# Altium footprint library Conectores.PcbLib: 55 footprints (part 3 of 4)
Each footprint in its own frame and in the unit in brackets; x right, y up, seen from the top. Pads: shape width x height; smd on the part's side, far side on the other; paste and mask are expansions set on the pad; w line width, h text height; cw(c..) or ccw(c..) is an arc to the next point about the centre after c.
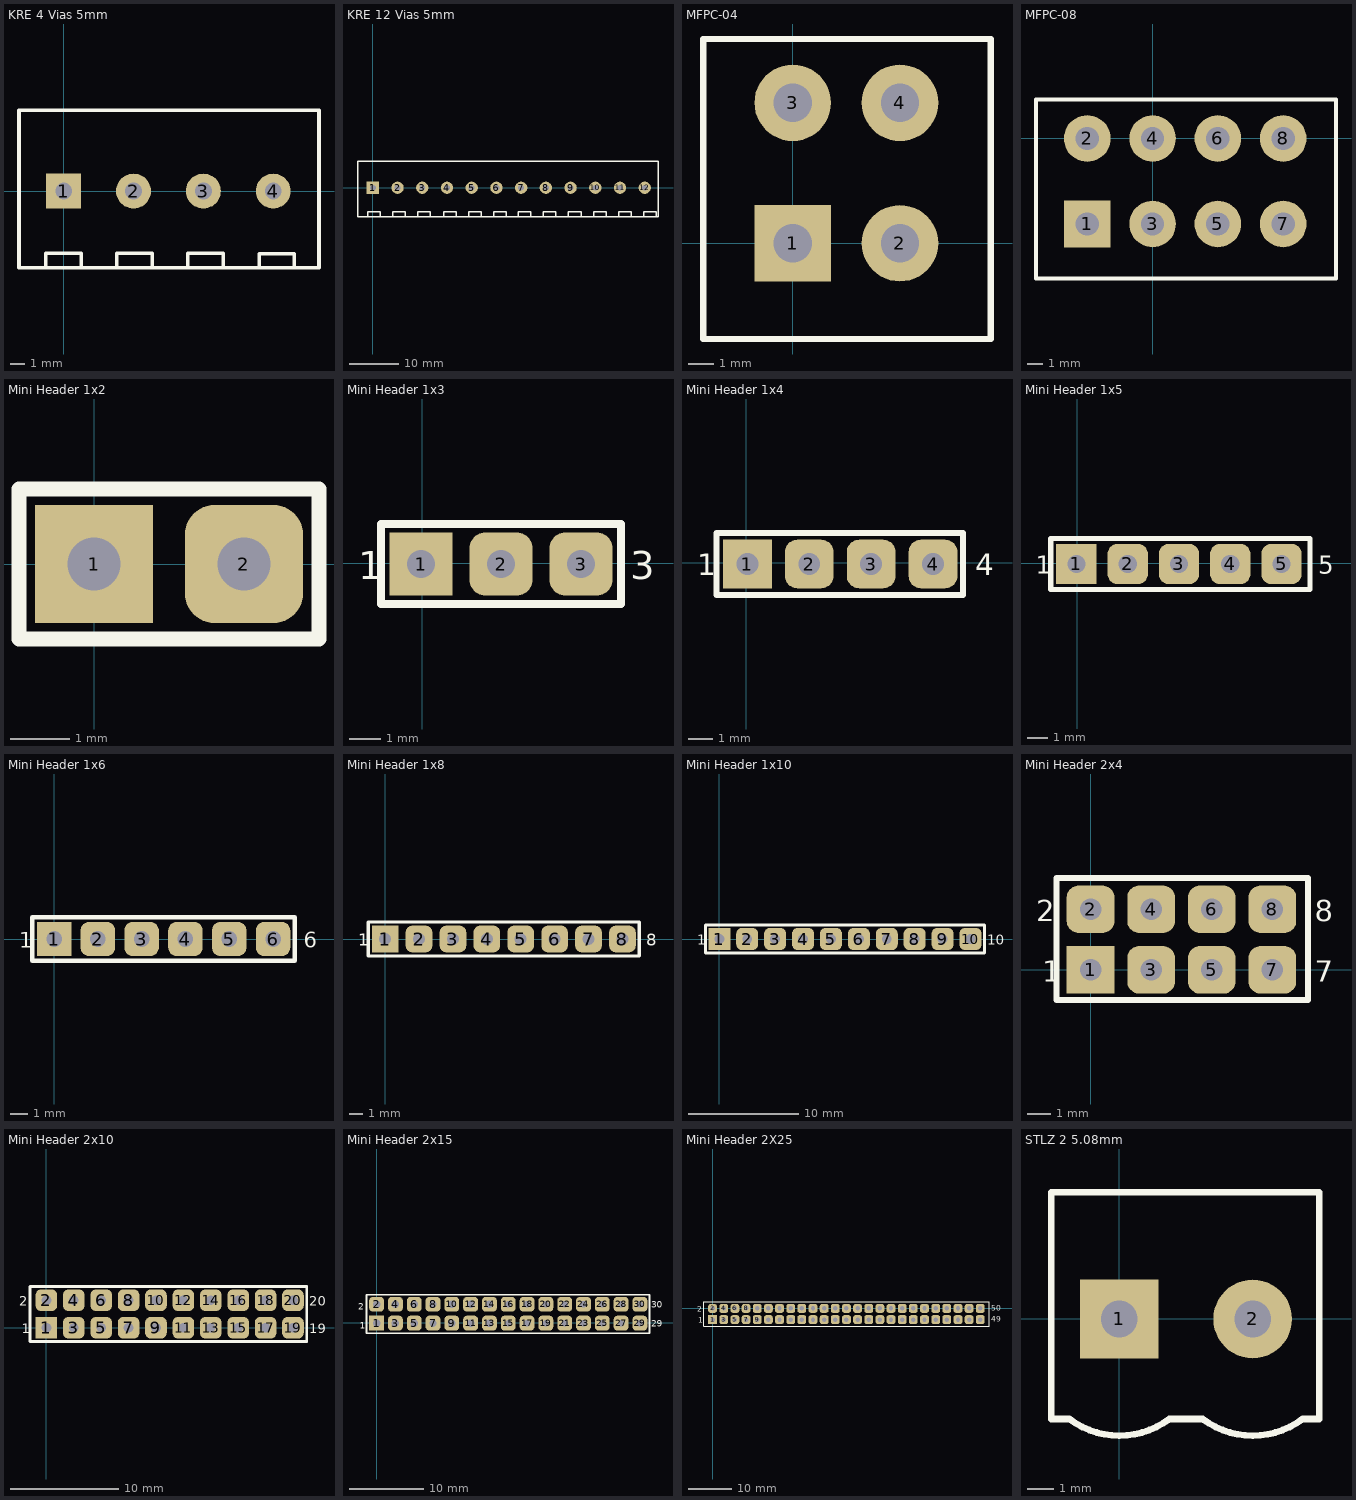
[diagram p2: the footprints below, top view; thin cyan lines are the x and y axes]

## KRE 4 Vias 5mm [mm] "Terminal Block 4 Pos. 5mm Pitch"
pads (4):
  rect 2.5x2.5 hole 1.2: 1(0,0)
  round 2.5 hole 1.2: 2(5,0) 3(10,0) 4(15,0)
Top Overlay:
  lines w0.254: -1.27,-5.5 -1.27,-4.445 1.27,-4.445 1.27,-5.08 1.27,-5.5 ; 3.81,-5.5 3.81,-4.445 6.35,-4.445 6.35,-5.5 ; 5.08,0 5.1,0 ; 8.89,-5.5 8.89,-4.445 11.43,-4.445 11.43,-5.5 ; 14,-5.5 14,-4.5 16.5,-4.5 16.5,-5.5 ; -3.2,-5.5 18.275,-5.5 18.275,5.8 -3.2,5.8 -3.2,-5.5 ; 15,0 15,0
3D body "User Library-DG128-5_0-02P-14.STEP": height 14.8, standoff -3, extent -2.725,-5.1 7.575,5.1
3D body "User Library-DG128-5_0-02P-14.STEP": height 14.8, standoff -3, extent 7.196,-5.091 17.496,5.109

## KRE 12 Vias 5mm [mm] "Terminal Block 12 Pos. 5mm Pitch"
pads (12):
  rect 2.5x2.5 hole 1.2: 1(0,0)
  round 2.5 hole 1.2: 2(5,0) 3(10,0) 4(15,0) 5(20,0) 6(25,0) 7(30,0) 8(35,0) 9(40,0) 10(45,0) 11(50,0) 12(55,0)
Top Overlay:
  lines w0.254: -1.07,-5.9 -1.07,-4.845 1.47,-4.845 1.47,-5.48 1.47,-5.9 ; 4.01,-5.9 4.01,-4.845 6.55,-4.845 6.55,-5.9 ; 9.09,-5.9 9.09,-4.845 11.63,-4.845 11.63,-5.9 ; 12.367,-5.9 28.167,-5.9 ; 12.367,5.4 28.167,5.4 ; 12.8,-5.9 -3,-5.9 -3,5.4 12.8,5.4 ; 14.297,-5.9 14.297,-4.845 16.837,-4.845 16.837,-5.48 16.837,-5.9 ; 19.377,-5.9 19.377,-4.845 21.917,-4.845 21.917,-5.9 ; 24.457,-5.9 24.457,-4.845 26.997,-4.845 26.997,-5.9 ; 27.48,-5.9 43.28,-5.9 ; 27.48,5.4 43.28,5.4 ; 29.41,-5.9 29.41,-4.845 31.95,-4.845 31.95,-5.48 31.95,-5.9 ; 34.49,-5.9 34.49,-4.845 37.03,-4.845 37.03,-5.9 ; 39.57,-5.9 39.57,-4.845 42.11,-4.845 42.11,-5.9 ; 42.72,-5.9 57.683,-5.9 57.683,5.4 42.72,5.4 ; 44.65,-5.9 44.65,-4.845 47.19,-4.845 47.19,-5.48 47.19,-5.9 ; 49.73,-5.9 49.73,-4.845 52.27,-4.845 52.27,-5.9 ; 54.81,-5.9 54.81,-4.845 57.35,-4.845 57.35,-5.9
3D body "User Library-DG128-5_0-03P-14.step": height 14.6, standoff -3, extent -2.85,-5.2 12.45,5
3D body "User Library-DG128-5_0-03P-14.step": height 14.6, standoff -3, extent 12.146,-5.203 27.446,4.997
3D body "User Library-DG128-5_0-03P-14.step": height 14.6, standoff -3, extent 27.157,-5.203 42.457,4.997
3D body "User Library-DG128-5_0-03P-14.step": height 14.6, standoff -3, extent 42.164,-5.196 57.464,5.004

## MFPC-04 [mm]
pads (4):
  rect 3x3 hole 1.5: 1(0,0)
  round 3 hole 1.5: 2(4.2,0) 3(0,5.5) 4(4.2,5.5)
Top Overlay:
  lines w0.254: -3.5,-3.75 7.75,-3.75 7.75,8 -3.5,8 -3.5,-3.75
3D body "mini fit.STEP": height 12.8, standoff -3.5, extent -3.1,-3.3 7.3,7.7

## MFPC-08 [mm]
pads (8):
  rect 3x3 hole 1.5: 1(-4.2,-5.5)
  round 3 hole 1.5: 2(-4.2,0) 3(0,-5.5) 4(0,0) 5(4.2,-5.5) 6(4.2,0) 7(8.4,-5.5) 8(8.4,0)
Top Overlay:
  lines w0.254: -7.5,-9 11.8,-9 11.8,2.5 -7.5,2.5 -7.5,-9
3D body "mini fit 8.STEP": height 12.8, standoff -3.5, extent -7.3,-8.7 11.5,2.3

## Mini Header 1x2 [mm] "Barra Pinos Femea 2 Vias 2.54mm"
pads (2):
  rect 2x2 hole 0.9: 1(0,0)
  rrect50% 2x2 hole 0.9: 2(2.54,0)
Top Overlay:
  lines w0.254: -1.27,-1.27 3.81,-1.27 3.81,1.27 -1.27,1.27 -1.27,-1.27
3D body "female_header_a-bl254-eg-z02d.STEP": height 8.75, standoff -2.95, extent -1.393,-1.228 3.937,1.272

## Mini Header 1x3 [mm] "MCS-03"
pads (3):
  rect 2x2 hole 0.9: 1(-0.031,-0.025)
  rrect50% 2x2 hole 0.9: 2(2.509,-0.025) 3(5.049,-0.025)
Top Overlay:
  lines w0.254: -1.301,-1.295 -1.301,1.245 6.319,1.245 6.319,-1.295 -1.301,-1.295
  text "1" at -2.032,-0.508 h0.89
  text "3" at 6.604,-0.508 h0.89
3D body "female_header_a-bl254-eg-z03d.STEP": height 8.75, standoff -2.95, extent -1.424,-1.253 6.446,1.247

## Mini Header 1x4 [mm] "MCS-04"
pads (4):
  rect 2x2 hole 0.9: 1(0.039,-0.044)
  rrect50% 2x2 hole 0.9: 2(2.579,-0.044) 3(5.119,-0.044) 4(7.659,-0.044)
Top Overlay:
  lines w0.254: -1.231,-1.314 8.89,-1.314 8.89,1.226 -1.231,1.226 -1.231,-1.314
  text "4" at 9.398,-0.508 h0.89
  text "1" at -2.032,-0.508 h0.89
3D body "female_header_a-bl254-eg-z04d.STEP": height 8.75, standoff -2.95, extent -1.319,-1.27 9.091,1.23

## Mini Header 1x5 [mm] "MCS-05"
pads (5):
  rect 2x2 hole 0.9: 1(-0.031,-0.025)
  rrect50% 2x2 hole 0.9: 2(2.509,-0.025) 3(5.049,-0.025) 4(7.589,-0.025) 5(10.129,-0.025)
Top Overlay:
  lines w0.254: -1.301,-1.295 11.532,-1.295 11.532,1.245 -1.301,1.245 -1.301,-1.295
  text "5" at 11.938,-0.508 h0.89
  text "1" at -2.032,-0.508 h0.89
3D body "female_header_a-bl254-eg-z05d.STEP": height 8.75, standoff -2.95, extent -1.426,-1.275 11.524,1.225

## Mini Header 1x6 [mm] "MCS-06"
pads (6):
  rect 2x2 hole 0.9 unplated: 1(0,0)
  rrect50% 2x2 hole 0.9 unplated: 2(2.54,0) 3(5.08,0) 4(7.62,0) 5(10.16,0) 6(12.7,0)
Top Overlay:
  lines w0.254: -1.27,-1.27 13.97,-1.27 13.97,1.27 -1.27,1.27 -1.27,-1.27
  text "6" at 14.478,-0.508 h0.89
  text "1" at -2.032,-0.508 h0.89
3D body "female_header_a-bl254-eg-z06d.STEP": height 8.75, standoff -2.95, extent -1.37,-1.25 14.12,1.25

## Mini Header 1x8 [mm] "MCS-08"
pads (8):
  rect 2x2 hole 0.9 unplated: 1(0,0)
  rrect50% 2x2 hole 0.9 unplated: 2(2.54,0) 3(5.08,0) 4(7.62,0) 5(10.16,0) 6(12.7,0) 7(15.24,0) 8(17.78,0)
Top Overlay:
  lines w0.254: -1.27,-1.27 19.05,-1.27 19.05,1.27 -1.27,1.27 -1.27,-1.27
  text "8" at 19.558,-0.508 h0.89
  text "1" at -2.032,-0.508 h0.89
3D body "female_header_a-bl254-eg-z08d.STEP": height 8.75, standoff -2.95, extent -1.418,-1.27 19.152,1.23

## Mini Header 1x10 [mm] "MCS-10"
pads (10):
  rect 2x2 hole 0.9 unplated: 1(0,0)
  rrect50% 2x2 hole 0.9 unplated: 2(2.54,0) 3(5.08,0) 4(7.62,0) 5(10.16,0) 6(12.7,0) 7(15.24,0) 8(17.78,0) 9(20.32,0) 10(22.86,0)
Top Overlay:
  lines w0.254: -1.27,-1.27 24.13,-1.27 24.13,1.27 -1.27,1.27 -1.27,-1.27
  text "1" at -2.032,-0.508 h0.89
  text "10" at 24.384,-0.508 h0.89
3D body "female_header_a-bl254-eg-z10d.STEP": height 8.75, standoff -2.95, extent -1.42,-1.245 24.23,1.255

## Mini Header 2x4 [mm] "MCD-04"
pads (8):
  rect 2x2 hole 0.9: 1(0,0)
  rrect50% 2x2 hole 0.9: 2(0,2.54) 3(2.54,0) 4(2.54,2.54) 5(5.08,0) 6(5.08,2.54) 7(7.62,0) 8(7.62,2.54)
Top Overlay:
  lines w0.254: -1.436,-1.27 -1.436,3.854 9.105,3.854 9.105,-1.27 -1.436,-1.27
  text "7" at 9.398,-0.508 h0.89
  text "8" at 9.398,2.032 h0.89
  text "1" at -2.032,-0.508 h0.89
  text "2" at -2.286,2.032 h0.89
3D body "female_header_a-bl254-eg-z04d.STEP": height 8.75, standoff -2.95, extent -1.36,1.263 9.05,3.763
3D body "female_header_a-bl254-eg-z04d.STEP": height 8.75, standoff -2.95, extent -1.36,-1.237 9.05,1.263

## Mini Header 2x10 [mm] "MCD-10"
pads (20):
  rect 2x2 hole 0.9 unplated: 1(0,0)
  rrect50% 2x2 hole 0.9 unplated: 2(0,2.54) 3(2.54,0) 4(2.54,2.54) 5(5.08,0) 6(5.08,2.54) 7(7.62,0) 8(7.62,2.54) 9(10.16,0) 10(10.16,2.54) 11(12.7,0) 12(12.7,2.54) 13(15.24,0) 14(15.24,2.54) 15(17.78,0) 16(17.78,2.54) 17(20.32,0) 18(20.32,2.54) 19(22.86,0) 20(22.86,2.54)
Top Overlay:
  lines w0.254: -1.524,-1.27 -1.524,3.81 24.13,3.81 24.13,1.27 24.13,-1.27 -1.524,-1.27
  text "20" at 24.384,2.032 h0.89
  text "1" at -2.286,-0.508 h0.89
  text "2" at -2.54,2.032 h0.89
  text "19" at 24.384,-0.508 h0.89
3D body "female_header_a-bl254-eg-z10d.STEP": height 8.75, standoff -2.95, extent -1.422,1.27 24.228,3.77
3D body "female_header_a-bl254-eg-z10d.STEP": height 8.75, standoff -2.95, extent -1.422,-1.23 24.228,1.27

## Mini Header 2x15 [mm] "MCD-15"
pads (30):
  rect 2x2 hole 1: 1(-0.031,-0.025)
  rrect50% 2x2 hole 1: 2(-0.031,2.515) 3(2.509,-0.025) 4(2.509,2.515) 5(5.049,-0.025) 6(5.049,2.515) 7(7.589,-0.025) 8(7.589,2.515) 9(10.129,-0.025) 10(10.129,2.515) 11(12.669,-0.025) 12(12.669,2.515) 13(15.209,-0.025) 14(15.209,2.515)
  rrect50% 2x2 hole 0.9: 15(17.749,-0.025) 16(17.749,2.515) 17(20.289,-0.025) 18(20.289,2.515) 19(22.829,-0.025) 20(22.829,2.515) 21(25.369,-0.025) 22(25.369,2.515) 23(27.909,-0.025) 24(27.909,2.515) 25(30.449,-0.025) 26(30.449,2.515) 27(32.989,-0.025) 28(32.989,2.515) 29(35.529,-0.025) 30(35.529,2.515)
Top Overlay:
  lines w0.254: -1.397,-1.397 -1.397,3.81 36.83,3.81 36.83,-1.397 -1.397,-1.397
  text "30" at 37.084,2.032 h0.89
  text "29" at 37.084,-0.508 h0.89
  text "1" at -2.286,-0.762 h0.89
  text "2" at -2.54,1.778 h0.89
3D body "female_header_a-bl254-eg-z05d.STEP": height 8.75, standoff -2.95, extent 24.007,1.239 36.957,3.739
3D body "female_header_a-bl254-eg-z05d.STEP": height 8.75, standoff -2.95, extent 11.278,1.234 24.228,3.734
3D body "female_header_a-bl254-eg-z05d.STEP": height 8.75, standoff -2.95, extent 24.003,-1.295 36.953,1.205
3D body "female_header_a-bl254-eg-z05d.STEP": height 8.75, standoff -2.95, extent 11.227,-1.295 24.177,1.205
3D body "female_header_a-bl254-eg-z05d.STEP": height 8.75, standoff -2.95, extent -1.418,1.234 11.532,3.734
3D body "female_header_a-bl254-eg-z05d.STEP": height 8.75, standoff -2.95, extent -1.418,-1.295 11.532,1.205

## Mini Header 2X25 [mm] "MCD-25"
pads (50):
  rect 2x2 hole 1: 1(0,-2.54)
  rrect50% 2x2 hole 1: 2(0,0) 3(2.54,-2.54) 4(2.54,0) 5(5.08,-2.54) 6(5.08,0) 7(7.62,-2.54) 8(7.62,0) 9(10.16,-2.54) 10(10.16,0) 11(12.7,-2.54) 12(12.7,0) 13(15.24,-2.54) 14(15.24,0) 15(17.78,-2.54) 16(17.78,0) 17(20.32,-2.54) 18(20.32,0) 19(22.86,-2.54) 20(22.86,0) 21(25.4,-2.54) 22(25.4,0) 23(27.94,-2.54) 24(27.94,0) 25(30.48,-2.54) 26(30.48,0) 27(33.02,-2.54) 28(33.02,0) 29(35.56,-2.54) 30(35.56,0) 31(38.1,-2.54) 32(38.1,0) 33(40.64,-2.54) 34(40.64,0) 35(43.18,-2.54) 36(43.18,0) 37(45.72,-2.54) 38(45.72,0) 39(48.26,-2.54) 40(48.26,0) 41(50.8,-2.54) 42(50.8,0) 43(53.34,-2.54) 44(53.34,0) 45(55.88,-2.54) 46(55.88,0) 47(58.42,-2.54) 48(58.42,0) 49(60.96,-2.54) 50(60.96,0)
Top Overlay:
  lines w0.254: -2.032,-4.064 -2.032,1.524 62.992,1.524 62.992,-4.064 -2.032,-4.064
  text "50" at 63.5,-0.508 h1.27
  text "49" at 63.5,-3.048 h1.27
  text "2" at -3.556,-0.762 h1.27
  text "1" at -3.302,-3.302 h1.27
3D body "zl305-19s_p2-54_l48-76_w2-5_h5.stp": height 5.25, standoff -2.75, extent 13.72,-1.25 62.48,1.25
3D body "zl305-19s_p2-54_l48-76_w2-5_h5.stp": height 5.25, standoff -2.75, extent 13.72,-3.79 62.48,-1.29
3D body "zl305-19s_p2-54_l48-76_w2-5_h5.stp": height 5.25, standoff -2.75, extent -1.52,-1.25 47.24,1.25
3D body "zl305-19s_p2-54_l48-76_w2-5_h5.stp": height 5.25, standoff -2.75, extent -1.52,-3.79 47.24,-1.29

## STLZ 2 5.08mm [mm] "Socket STLZ 2 Pos. 5.08mm Pitch"
pads (2):
  rect 3x3 hole 1.4: 1(0,0)
  round 3 hole 1.4: 2(5.08,0)
Top Overlay:
  lines w0.254: -2.6,-3.81 -2.6,4.825 7.62,4.825 7.62,-3.81 6.985,-3.81 cw(c5.08,-1.27) 3.175,-3.81 1.905,-3.81 cw(c0,-1.27) -1.905,-3.81 -2.54,-3.81 ; 5.08,0 5.1,0
3D body "STLZ 2 vias.STEP": height 12.5, standoff -3.5, extent -2.58,-3.8 7.58,4.7